# Altium footprint library SYNCBOX_TST.PcbLib: 267 footprints (part 2 of 17)
Each footprint in its own frame and in the unit in brackets; x right, y up, seen from the top. Pads: shape width x height; smd on the part's side, far side on the other; paste and mask are expansions set on the pad; w line width, h text height; cw(c..) or ccw(c..) is an arc to the next point about the centre after c.
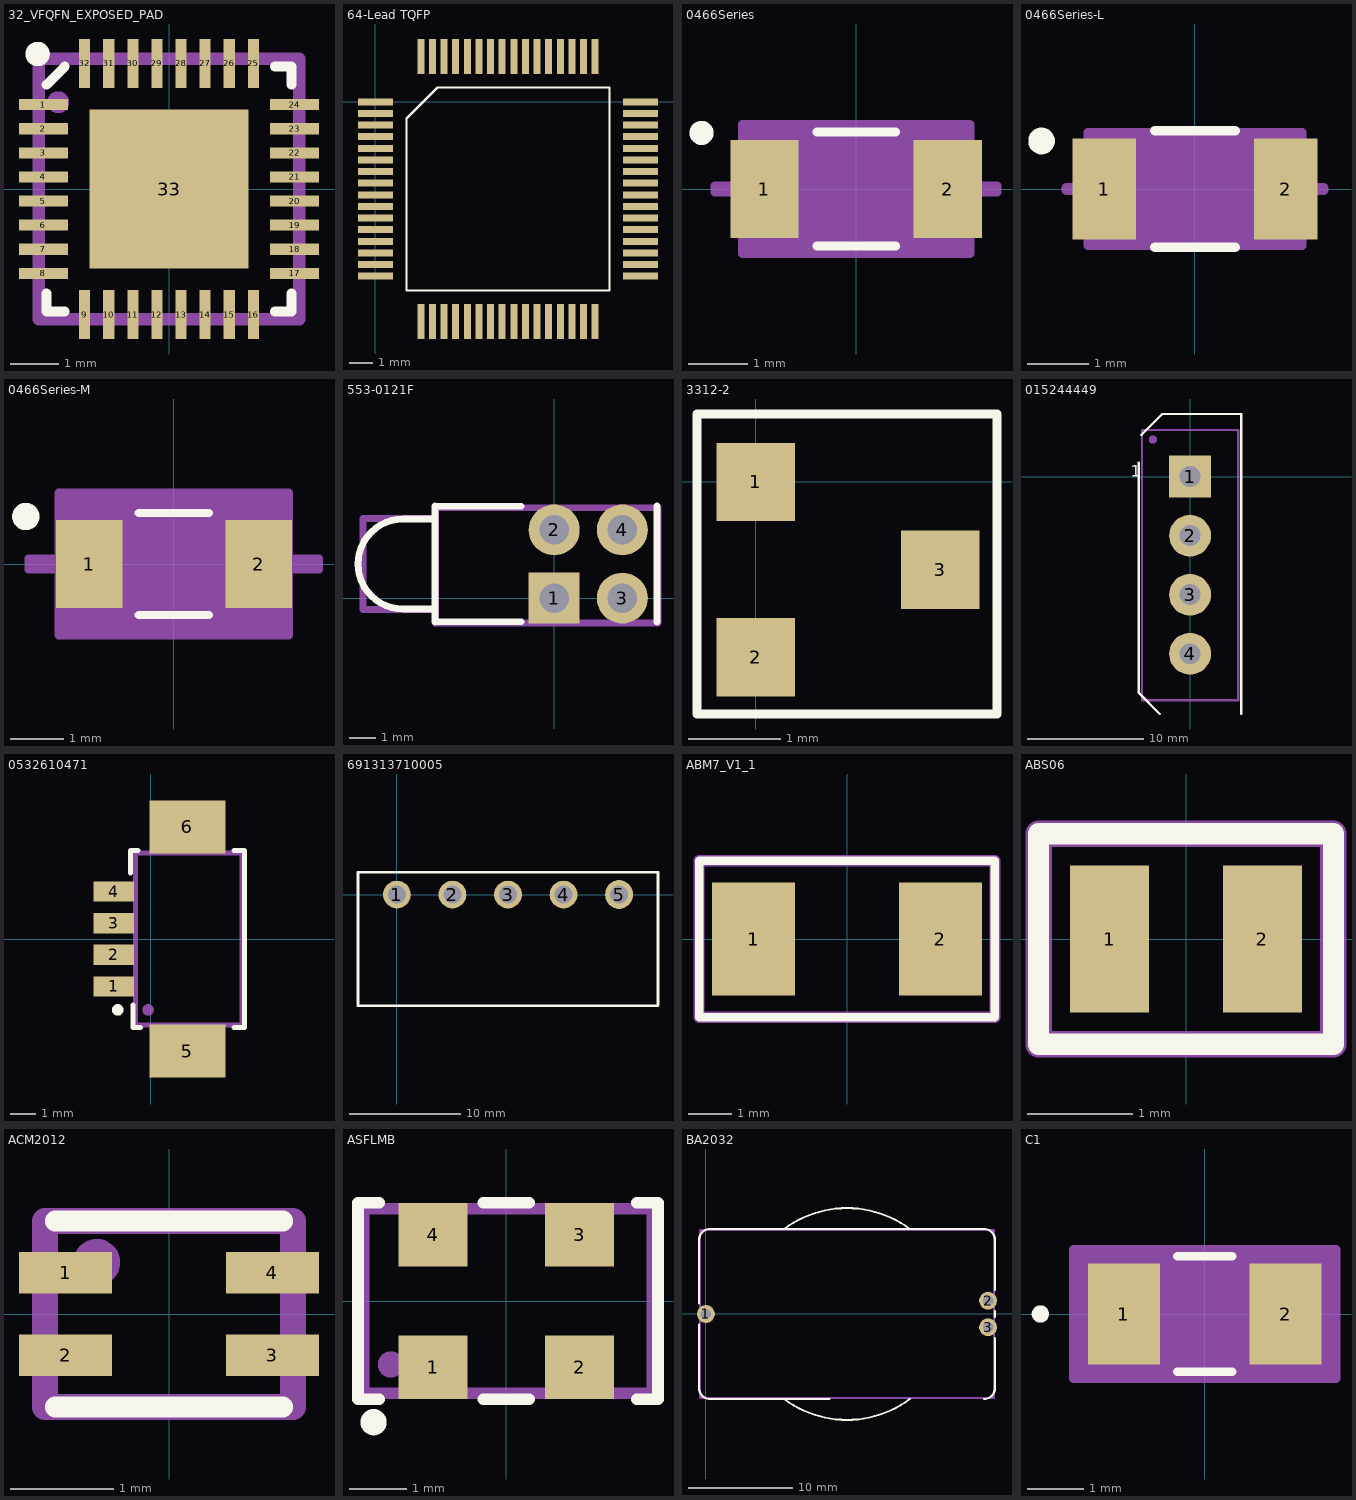
[diagram p1: the footprints below, top view; thin cyan lines are the x and y axes]

## 32_VFQFN_EXPOSED_PAD [mm]
pads (33):
  rect 1.016x0.23 smd mask+0.051: 1(-2.603,1.75) 2(-2.603,1.25) 3(-2.603,0.75) 4(-2.603,0.25) 5(-2.603,-0.25) 6(-2.603,-0.75) 7(-2.603,-1.25) 8(-2.603,-1.75) 17(2.603,-1.75) 18(2.603,-1.25) 19(2.603,-0.75) 20(2.603,-0.25) 21(2.603,0.25) 22(2.603,0.75) 23(2.603,1.25) 24(2.603,1.75)
  rect 0.23x1.016 smd mask+0.051: 9(-1.75,-2.603) 10(-1.25,-2.603) 11(-0.75,-2.603) 12(-0.25,-2.603) 13(0.25,-2.603) 14(0.75,-2.603) 15(1.25,-2.603) 16(1.75,-2.603) 25(1.75,2.603) 26(1.25,2.603) 27(0.75,2.603) 28(0.25,2.603) 29(-0.25,2.603) 30(-0.75,2.603) 31(-1.25,2.603) 32(-1.75,2.603)
  rect 3.3x3.3 smd paste-10 mask+0.051: 33(0,0)
Top Overlay:
  circle w0.254: c-2.727,2.8 r0.127
  lines w0.2: -2.54,-2.54 -2.54,-2.159 ; -2.54,2.159 -2.159,2.54 ; -2.508,-2.54 -2.159,-2.54 ; 2.191,-2.54 2.54,-2.54 2.54,-2.159 ; 2.191,2.54 2.54,2.54 2.54,2.159
Top Paste:
  rectangle: -1.5,0.1 -0.1,1.5
  rectangle: 0.1,0.1 1.5,1.5
  rectangle: -1.5,-1.5 -0.1,-0.1
  rectangle: 0.1,-1.5 1.5,-0.1
Mechanical 16:
  circle w0.254: c-2.3,1.8 r0.1
  lines w0.254: -2.7,-2.7 -2.7,2.7 2.7,2.7 2.7,-2.7 -2.7,-2.7
Mechanical 29:
  text ".Designator" at 2,0.7 h1.52
3D body: height 0.9, standoff 0, extent -2.54,-2.54 2.54,2.54

## 64-Lead TQFP [mm]
pads (64):
  rect 1.5x0.3 smd: 1(0,0) 2(0,-0.5) 3(0,-1) 4(0,-1.5) 5(0,-2) 6(0,-2.5) 7(0,-3) 8(0,-3.5) 9(0,-4) 10(0,-4.5) 11(0,-5) 12(0,-5.5) 13(0,-6) 14(0,-6.5) 15(0,-7) 16(0,-7.5) 33(11.4,-7.5) 34(11.4,-7) 35(11.4,-6.5) 36(11.4,-6) 37(11.4,-5.5) 38(11.4,-5) 39(11.4,-4.5) 40(11.4,-4) 41(11.4,-3.5) 42(11.4,-3) 43(11.4,-2.5) 44(11.4,-2) 45(11.4,-1.5) 46(11.4,-1) 47(11.4,-0.5) 48(11.4,0)
  rect 0.3x1.5 smd: 17(1.95,-9.45) 18(2.45,-9.45) 19(2.95,-9.45) 20(3.45,-9.45) 21(3.95,-9.45) 22(4.45,-9.45) 23(4.95,-9.45) 24(5.45,-9.45) 25(5.95,-9.45) 26(6.45,-9.45) 27(6.95,-9.45) 28(7.45,-9.45) 29(7.95,-9.45) 30(8.45,-9.45) 31(8.95,-9.45) 32(9.45,-9.45) 49(9.45,1.95) 50(8.95,1.95) 51(8.45,1.95) 52(7.95,1.95) 53(7.45,1.95) 54(6.95,1.95) 55(6.45,1.95) 56(5.95,1.95) 57(5.45,1.95) 58(4.95,1.95) 59(4.45,1.95) 60(3.95,1.95) 61(3.45,1.95) 62(2.95,1.95) 63(2.45,1.95) 64(1.95,1.95)
Top Overlay:
  lines w0.1: 1.335,-8.115 10.065,-8.115 10.065,0.615 2.67,0.615 1.335,-0.72 1.335,-8.115
3D body "TQFP64_10x10MC.stp": height 1.2, standoff 0, extent -0.279,-9.753 11.709,2.235

## 0466Series [mil]
pads (2):
  rect 45x65 smd paste+0 mask+1: 1(-60.5,0) 2(60.5,0)
Top Overlay:
  circle w10: c-102,37 r3
  lines w6: -25.89,-37.5 25.89,-37.5 ; -25.89,37.5 25.89,37.5
Mechanical 13:
  lines w0: -65,-13.5 ccw(c-65,0) -65,13.5 ; 65,-13.5 cw(c65,0) 65,13.5
  lines w1: -65,-13.5 -65,-32.5 65,-32.5 65,-13.5 ; -65,13.5 -65,32.5 65,32.5 65,13.5 ; -65,22.5 -55,32.5
  text "*" at -52.5,-12.5 h50
Mechanical 15:
  region: -75,-2 -93,-2 -93,2 -75,2 -75,42.5 75,42.5 75,2 93,2 93,-2 75,-2 75,-42.5 -75,-42.5
  lines w6: -93,-2 -75,-2 -75,-42.5 75,-42.5 75,-2 93,-2 93,2 75,2 75,42.5 -75,42.5 -75,2 -93,2 -93,-2
3D body: height 10, standoff 0, extent 0,0 10,10
3D body "C1.stp": height 30.98, standoff 0, extent -67,-35 67.01,35

## 0466Series-L [mil]
pads (2):
  rect 41x65 smd paste+0 mask+1: 1(-58.5,0) 2(58.5,0)
Top Overlay:
  circle w10: c-99,31 r3.61
  lines w6: -25.89,-37.5 25.89,-37.5 ; -25.89,37.5 25.89,37.5
Mechanical 13:
  lines w0: -65,-13.5 ccw(c-65,0) -65,13.5 ; 65,-13.5 cw(c65,0) 65,13.5
  lines w1: -65,-13.5 -65,-32.5 65,-32.5 65,-13.5 ; -65,13.5 -65,32.5 65,32.5 65,13.5 ; -65,22.5 -55,32.5
  text "*" at -52.5,-12.5 h50
Mechanical 15:
  region: -69,-0.8 -83,-0.8 -83,0.8 -69,0.8 -69,36.5 69,36.5 69,0.8 83,0.8 83,-0.8 69,-0.8 69,-36.5 -69,-36.5
  lines w6: -83,-0.8 -83,0.8 -69,0.8 -69,36.5 69,36.5 69,0.8 83,0.8 83,-0.8 69,-0.8 69,-36.5 -69,-36.5 -69,-0.8 -83,-0.8
3D body: height 10, standoff 0, extent 0,0 10,10
3D body "C1-L.stp": height 30.98, standoff 0, extent -67,-35 67.01,35

## 0466Series-M [mil]
pads (2):
  rect 49x65 smd paste+0 mask+1: 1(-62.5,0) 2(62.5,0)
Top Overlay:
  circle w10: c-109,35 r5.1
  lines w6: -25.89,-37.5 25.89,-37.5 ; -25.89,37.5 25.89,37.5
Mechanical 13:
  lines w0: -65,-13.5 ccw(c-65,0) -65,13.5 ; 65,-13.5 cw(c65,0) 65,13.5
  lines w1: -65,-13.5 -65,-32.5 65,-32.5 65,-13.5 ; -65,13.5 -65,32.5 65,32.5 65,13.5 ; -65,22.5 -55,32.5
  text "*" at -52.5,-12.5 h50
Mechanical 15:
  region: -85,-4 -107,-4 -107,4 -85,4 -85,52.5 85,52.5 85,4 107,4 107,-4 85,-4 85,-52.5 -85,-52.5
  lines w6: -107,-4 -107,4 -85,4 -85,52.5 85,52.5 85,4 107,4 107,-4 85,-4 85,-52.5 -85,-52.5 -85,-4 -107,-4
3D body "C1-M.stp": height 30.98, standoff 0, extent -67,-35 67.01,35
3D body: height 10, standoff 0, extent 0,0 10,10

## 553-0121F [mm]
pads (4):
  rect 1.9x1.9 hole 1.1: 1(0,0)
  round 1.9 hole 1.1: 2(0,2.54) 3(2.54,0) 4(2.54,2.54)
Top Overlay:
  lines w0.254: -4.445,-0.889 -4.445,3.429 ; -4.445,-0.406 -5.639,-0.406 cw(c-5.639,1.27) -5.639,2.946 -4.445,2.946 ; -4.43,-0.88 -1.23,-0.88 ; -4.43,3.42 -1.23,3.42 ; 3.833,-0.889 3.833,3.429
Mechanical 16:
  lines w0.254: -4.43,-0.43 -7.13,-0.43 -7.13,2.97 -4.43,2.97 ; -4.43,-0.93 -4.43,3.37 3.87,3.37 3.87,-0.93 -4.43,-0.93
Mechanical 29:
  text ".Designator" at -2.5,0.5 h1.52
3D body "55307XXF.stp": height 9.65, standoff -3.68, extent -7.28,-0.898 3.718,3.42

## 3312-2 [mm]
pads (3):
  rect 0.85x0.85 smd: 1(0,0) 2(0,-1.9) 3(2,-0.95)
Top Overlay:
  lines w0.1: -0.635,-2.515 -0.635,0.737 2.616,0.737 2.616,-2.515 -0.635,-2.515
3D body "cdsot23-txxc_series.stp": height 1.06, standoff 0, extent -0.185,-2.425 2.115,0.495

## 015244449 [mm]
pads (4):
  rect 3.6x3.6 hole 1.8: 1(0,0)
  round 3.6 hole 1.8: 2(0,-5.08) 3(0,-10.16) 4(0,-15.24)
Top Overlay:
  lines w0.2: -4.4,1.2 -4.4,-18.62 -2.6,-20.42 ; -4.2,3.58 -2.4,5.38 4.4,5.38 4.4,-20.42
  text "1" at -5.1,0 h1.02
Mechanical 16:
  circle w0.5: c-3.2,3.18 r0.1
  lines w0.2: -4.14,-19.25 4.14,-19.25 4.14,4.01 -4.14,4.01 -4.14,-19.25
Mechanical 29:
  text ".Designator" at 0.5,-10.02 h1.52
3D body "015244449.stp": height 10.16, standoff -3.6, extent -4.13,-19.25 4.15,4.01

## 0532610471 [mm]
pads (6):
  rect 1.6x0.8 smd: 1(-1.45,-1.875) 2(-1.45,-0.625) 3(-1.45,0.625) 4(-1.45,1.875)
  rect 3x2.1 smd: 5(1.45,-4.425) 6(1.45,4.425)
Top Overlay:
  circle w0.254: c-1.3,-2.8 r0.1
  lines w0.2: -0.8,2.6 -0.8,3.5 -0.5,3.5 ; -0.7,-2.6 -0.7,-3.5 -0.4,-3.5 ; 3.3,-3.5 3.7,-3.5 3.7,3.5 3.3,3.5
Mechanical 16:
  circle w0.254: c-0.1,-2.8 r0.1
  lines w0.2: -0.6,-3.4 -0.6,3.4 3.6,3.4 3.6,-3.4 -0.6,-3.4
Mechanical 29:
  text ".Designator" at 2.1,-2 h1.52
3D body "532610471.stp": height 3.39, standoff -0.01, extent -1.6,-5.075 3.6,5.075

## 691313710005 [mm]
pads (5):
  round 2.5 hole 1.6: 1(0,0) 2(5,0) 3(10,0) 4(15,0)
  oval 2.5x2.6 hole 1.6: 5(20,0)
Top Overlay:
  lines w0.254: -3.5,-10 23.452,-10 ; -3.5,-9.83 -3.5,2 23.5,2 23.5,-9.952
3D body "691313710005 (rev1).stp": height 8.57, standoff -3.43, extent -3.441,-10.064 23.559,1.936

## ABM7_V1_1 [mm]
pads (2):
  rect 1.9x2.6 smd: 1(-2.15,0) 2(2.15,0)
Top Overlay:
  lines w0.2: -3.4,-1.8 -3.4,1.8 3.4,1.8 3.4,-1.8 -3.4,-1.8
Mechanical 16:
  lines w0.254: -3.4,-1.8 -3.4,1.8 3.4,1.8 3.4,-1.8 -3.4,-1.8
Mechanical 29:
  text ".Designator" at 0.9,0.6 h1.52
3D body "Xtal-ABM7.STEP": height 1.44, standoff 0.04, extent -3.1,-1.85 3.1,1.85
3D body: height 1.45, standoff 1.4, extent -2,-1.3 2,1.5

## ABS06 [mm]
pads (2):
  rect 0.75x1.4 smd: 1(-0.725,0) 2(0.725,0)
Top Overlay:
  lines w0.2: -1.4,-1 1.4,-1 1.4,1 -1.4,1 -1.4,0 -1.4,-1
Mechanical 16:
  lines w0.254: -1.4,-1 -1.4,1 1.4,1 1.4,-1 -1.4,-1
Mechanical 29:
  text ".Designator" at -0.5,-0.3 h0.6
3D body: height 0.61, standoff 0.5, extent -0.825,-0.36 0.825,0.34
3D body "ABS06.STEP": height 0.6, standoff 0, extent -1,-0.62 1,0.6

## ACM2012 [mm]
pads (4):
  rect 0.902x0.4 smd mask+0.076: 1(-1.001,0.4) 2(-1.001,-0.4) 3(1.001,-0.4) 4(1.001,0.4)
Top Overlay:
  lines w0.2: -1.1,-0.9 1.1,-0.9 ; -1.1,0.9 1.1,0.9
Mechanical 16:
  circle w0.254: c-0.7,0.5 r0.1
  lines w0.254: -1.2,-0.9 1.2,-0.9 1.2,0.9 -1.2,0.9 -1.2,-0.9
Mechanical 29:
  text ".Designator" at 0.3,0.1 h0.4
3D body: height 1.3, standoff 0, extent -1.175,-0.725 1.225,0.675

## ASFLMB [mm]
pads (4):
  rect 1.2x1.1 smd: 1(-1.27,-1.15) 2(1.27,-1.15) 3(1.27,1.15) 4(-1.27,1.15)
Top Overlay:
  circle w0.254: c-2.3,-2.1 r0.1
  lines w0.2: -2.2,-1.7 -2.57,-1.7 -2.57,1.7 -2.2,1.7 ; -0.4,-1.7 0.4,-1.7 ; -0.4,1.7 0.4,1.7 ; 2.26,-1.7 2.63,-1.7 2.63,1.7 2.26,1.7
Mechanical 16:
  circle w0.254: c-2,-1.1 r0.1
  lines w0.2: -2.47,-1.6 -2.47,1.6 2.53,1.6 2.53,-1.6 -2.47,-1.6
Mechanical 29:
  text ".Designator" at 0.3,-0.5 h0.8
3D body: height 0.9, standoff 0, extent -2.47,-1.6 2.53,1.6

## BA2032 [mm]
pads (3):
  round 1.7 hole 1: 1(0,0) 2(26.9,1.27) 3(26.9,-1.27)
Top Overlay:
  lines w0.2: -0.65,-1 -0.65,-7.1 ccw(c0.375,-7.075) 0.4,-8.1 11.8,-8.1 ; -0.65,1 -0.65,7.1 cw(c0.375,7.075) 0.4,8.1 26.5,8.1 cw(c26.525,7.075) 27.55,7.1 27.55,2.3 ; 7.45,-8.1 ccw(c13.45,-0.1) 19.45,-8.1 ; 7.45,8.1 cw(c13.45,0.1) 19.45,8.1 ; 26.5,-8.1 ccw(c26.525,-7.075) 27.55,-7.1 27.55,-2.3 ; 27.55,-0.3 27.55,0.3
Mechanical 16:
  lines w0.2: -0.55,-8 -0.55,8 27.45,8 27.45,-8 -0.55,-8
Mechanical 29:
  text ".Designator" at 13,2.1 h1.52
3D body "BU2032-1-HD-G.STEP": height 5.25, standoff -3.8, extent -0.85,-10 27.75,10

## C1 [mil]
pads (2):
  rect 50x70 smd paste+0 mask+0: 1(-56,0) 2(56,0)
Top Overlay:
  circle w6: c-114,0 r3
  lines w6: -18.89,-40 18.89,-40 ; -18.89,40 18.89,40
Mechanical 13:
  circle w0: c-57,0 r3
  lines w1: -67,-35 -67,35 ; -67,-35 -31,-35 -31,35 -67,35 ; -67,-35 67,-35 ; -67,-35 -67,35 ; -67,35 67,35 ; 67,-35 31,-35 31,35 67,35 ; 67,-35 67,35 ; 67,-35 67,35
Mechanical 15:
  region: 91,-45 -91,-45 -91,45 91,45
  lines w6: -91,-45 -91,45 91,45 91,-45 -91,-45
3D body "C1.stp": height 30.98, standoff 0, extent -67.01,-35 67.01,35
3D body: height 10, standoff 0, extent 0,0 10,10